# Altium schematic symbol library CRCW25121K50FKEGHP.SchLib: 1 symbol
Pins are listed as number, name and electrical type; pins without a type are passive.

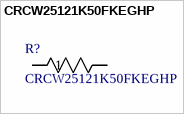
[diagram p0: symbol CRCW25121K50FKEGHP]

## CRCW25121K50FKEGHP
designator R?
CRCW2512-HP 100 1K5 1% E67 E3; Manufacturer_Name: Vishay; Type: Chip Resistor - Surface Mount; Copyright: Copyright (C) 2026 Ultra Librarian. All rights reserved.; Manufacturer_Part_Number: CRCW25121K50FKEGHP; Datasheet: https://www.vishay.com/doc?20043
footprint RES_0FKEGHP_VIS
pins: 1, 2